# Altium footprint library Altium_Box_Header_MPC3.PcbLib: 235 footprints (part 8 of 15)
Each footprint in its own frame and in the unit in brackets; x right, y up, seen from the top. Pads: shape width x height; smd on the part's side, far side on the other; paste and mask are expansions set on the pad; w line width, h text height; cw(c..) or ccw(c..) is an arc to the next point about the centre after c.
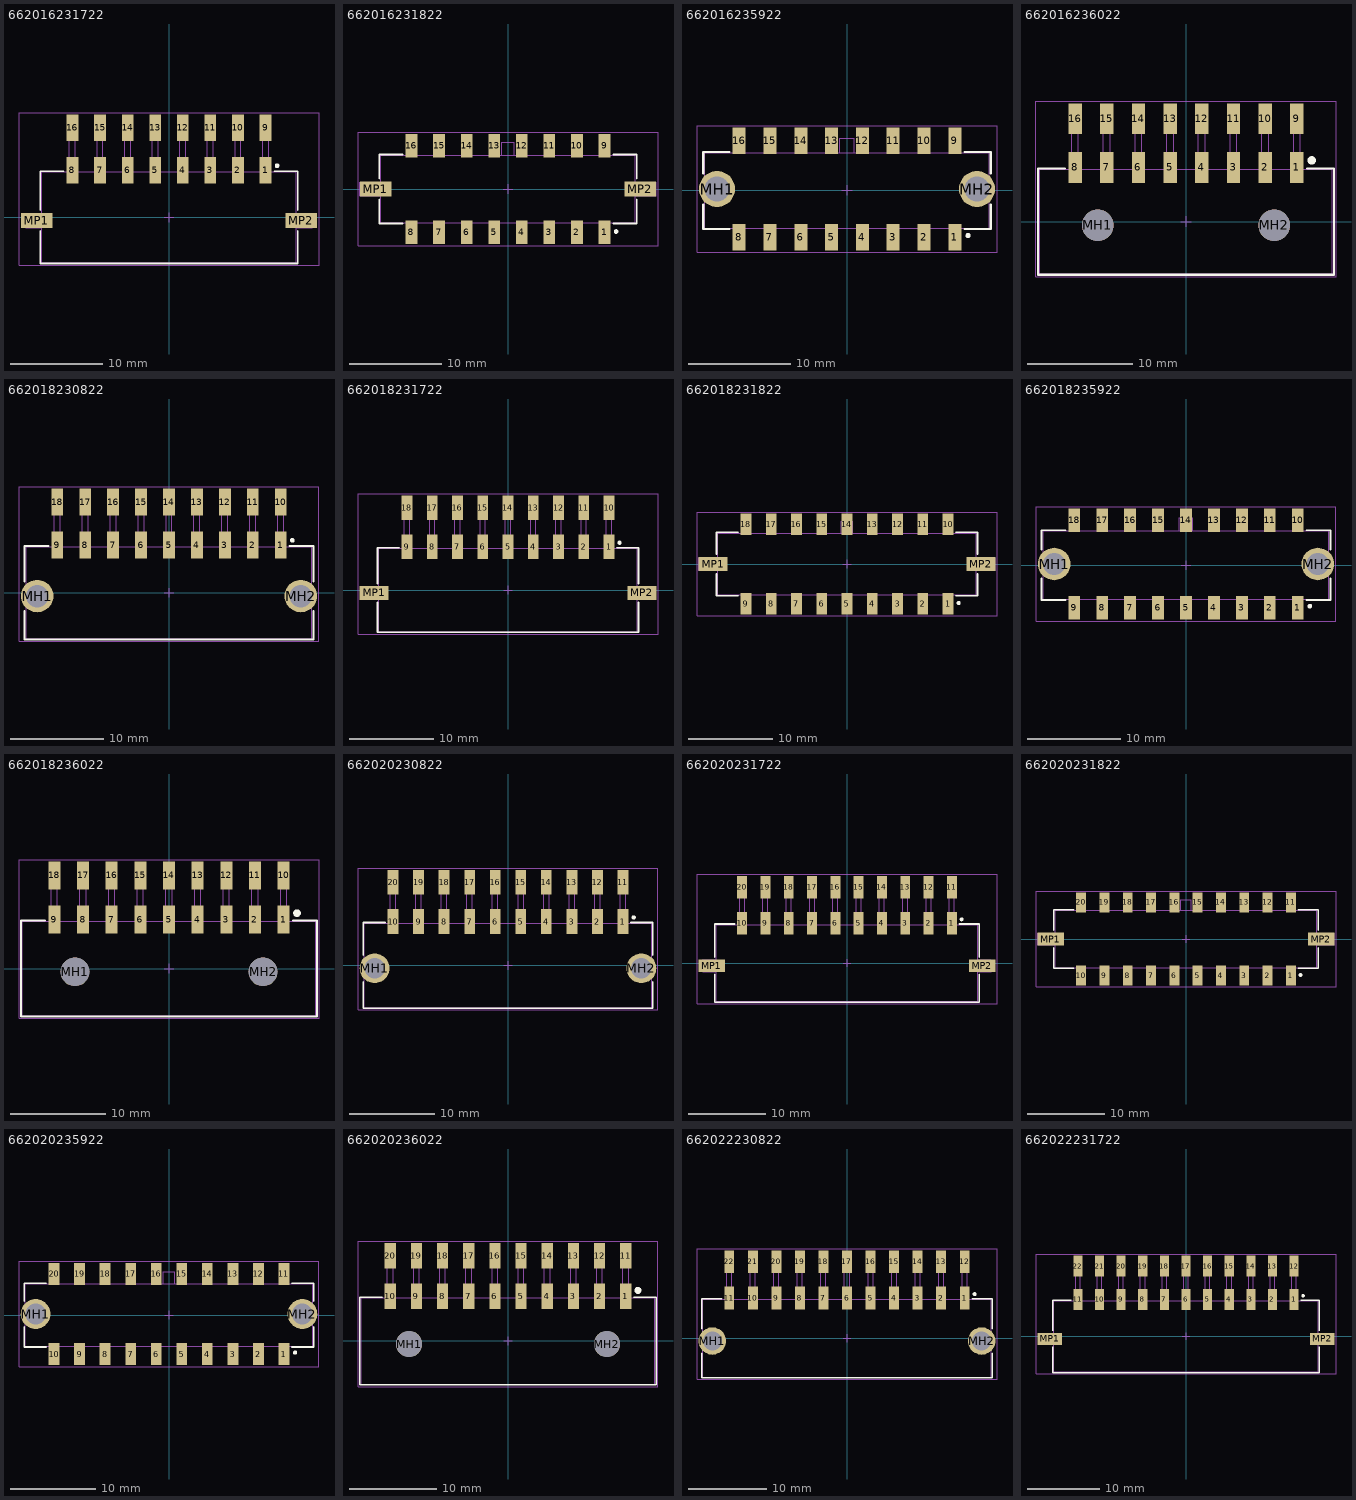
[diagram p7: the footprints below, top view; thin cyan lines are the x and y axes]

## 662016231722 [mm] "3.00mm SMT Male Dual Row Angled Header with SMT Solder Tab, 16p"
height 8.26
pads (18):
  rect 1.27x2.92 smd: 1(10.5,5.13) 2(7.5,5.13) 3(4.5,5.13) 4(1.5,5.13) 5(-1.5,5.13) 6(-4.5,5.13) 7(-7.5,5.13) 8(-10.5,5.13) 9(10.5,9.75) 10(7.5,9.75) 11(4.5,9.75) 12(1.5,9.75) 13(-1.5,9.75) 14(-4.5,9.75) 15(-7.5,9.75) 16(-10.5,9.75)
  rect 3.43x1.65 smd: MP1(-14.395,-0.35) MP2(14.395,-0.35)
Top Overlay:
  circle w0.25: c11.75,5.625 r0.125
  lines w0.2: -14,-1.475 -14,-5.025 14,-5.025 14,-1.475 ; -14,0.775 -14,5.025 -11.45,5.025 ; 11.45,5.025 14,5.025 14,0.775
Top Designator:
  text ".Designator" at -7.498,-0.5 h1.5
Top Component Outline:
  lines w0.1: -13.85,-1.1 -15.55,-1.1 -15.55,0.4 -13.85,0.4 ; -10.82,4.95 -10.82,10.95 -10.18,10.95 -10.18,4.95 ; -10.82,6.3 -10.18,6.3 ; -7.82,4.95 -7.82,10.95 -7.18,10.95 -7.18,4.95 ; -7.82,6.3 -7.18,6.3 ; -4.82,4.95 -4.82,10.95 -4.18,10.95 -4.18,4.95 ; -4.82,6.3 -4.18,6.3 ; -1.82,4.95 -1.82,10.95 -1.18,10.95 -1.18,4.95 ; -1.82,6.3 -1.18,6.3 ; 1.18,4.95 1.18,10.95 1.82,10.95 1.82,4.95 ; 1.18,6.3 1.82,6.3 ; 4.18,4.95 4.18,10.95 4.82,10.95 4.82,4.95 ; 4.18,6.3 4.82,6.3 ; 7.18,4.95 7.18,10.95 7.82,10.95 7.82,4.95 ; 7.18,6.3 7.82,6.3 ; 10.18,4.95 10.18,10.95 10.82,10.95 10.82,4.95 ; 10.18,6.3 10.82,6.3 ; 13.85,-1.1 15.55,-1.1 15.55,0.4 13.85,0.4 ; -13.85,-4.95 -13.85,4.95 13.85,4.95 13.85,-4.95 -13.85,-4.95
Top 3D Body:
  lines w0.1: -13.85,-1.1 -15.55,-1.1 -15.55,0.4 -13.85,0.4 ; -10.82,4.95 -10.82,10.95 -10.18,10.95 -10.18,4.95 ; -10.82,6.3 -10.18,6.3 ; -7.82,4.95 -7.82,10.95 -7.18,10.95 -7.18,4.95 ; -7.82,6.3 -7.18,6.3 ; -4.82,4.95 -4.82,10.95 -4.18,10.95 -4.18,4.95 ; -4.82,6.3 -4.18,6.3 ; -1.82,4.95 -1.82,10.95 -1.18,10.95 -1.18,4.95 ; -1.82,6.3 -1.18,6.3 ; 1.18,4.95 1.18,10.95 1.82,10.95 1.82,4.95 ; 1.18,6.3 1.82,6.3 ; 4.18,4.95 4.18,10.95 4.82,10.95 4.82,4.95 ; 4.18,6.3 4.82,6.3 ; 7.18,4.95 7.18,10.95 7.82,10.95 7.82,4.95 ; 7.18,6.3 7.82,6.3 ; 10.18,4.95 10.18,10.95 10.82,10.95 10.82,4.95 ; 10.18,6.3 10.82,6.3 ; 13.85,-1.1 15.55,-1.1 15.55,0.4 13.85,0.4 ; -13.85,-4.95 -13.85,4.95 13.85,4.95 13.85,-4.95 -13.85,-4.95
Top Courtyard:
  lines w0.05: -16.31,-5.225 -16.31,11.41 16.31,11.41 16.31,-5.225 -16.31,-5.225
Top Component Center:
  lines w0.05: -0.5,0 0.5,0 ; 0,-0.5 0,0.5
3D body "662016231722.stp": height 8.79, standoff 0.03, extent -15.55,-4.95 15.55,10.95

## 662016231822 [mm] "3.00mm SMT Male Dual Row Vertical Header with SMT Solder Tab, 16p"
height 9.9
pads (18):
  rect 1.27x2.54 smd: 1(10.5,-4.7) 2(7.5,-4.7) 3(4.5,-4.7) 4(1.5,-4.7) 5(-1.5,-4.7) 6(-4.5,-4.7) 7(-7.5,-4.7) 8(-10.5,-4.7) 9(10.5,4.7) 10(7.5,4.7) 11(4.5,4.7) 12(1.5,4.7) 13(-1.5,4.7) 14(-4.5,4.7) 15(-7.5,4.7) 16(-10.5,4.7)
  rect 3.43x1.65 smd: MP1(-14.395,0) MP2(14.395,0)
Top Overlay:
  circle w0.25: c11.75,-4.625 r0.125
  lines w0.2: -14,-1.155 -14,-3.755 -11.45,-3.755 ; -14,1.155 -14,3.755 -11.45,3.755 ; 11.45,-3.755 14,-3.755 14,-1.155 ; 11.45,3.755 14,3.755 14,1.155
Top Designator:
  text ".Designator" at -7.498,-0.5 h1.5
Top Component Outline:
  lines w0.1: -13.85,-0.75 -16.1,-0.75 -16.1,0.75 -13.85,0.75 ; -10.82,-3.68 -10.82,-5.698 -10.18,-5.698 -10.18,-3.68 ; -10.82,3.68 -10.82,5.698 -10.18,5.698 -10.18,3.68 ; -7.82,-3.68 -7.82,-5.698 -7.18,-5.698 -7.18,-3.68 ; -7.82,3.68 -7.82,5.698 -7.18,5.698 -7.18,3.68 ; -4.82,-3.68 -4.82,-5.698 -4.18,-5.698 -4.18,-3.68 ; -4.82,3.68 -4.82,5.698 -4.18,5.698 -4.18,3.68 ; -1.82,-3.68 -1.82,-5.698 -1.18,-5.698 -1.18,-3.68 ; -1.82,3.68 -1.82,5.698 -1.18,5.698 -1.18,3.68 ; -0.7,3.68 -0.7,5.08 0.7,5.08 0.7,3.68 ; 1.18,-3.68 1.18,-5.698 1.82,-5.698 1.82,-3.68 ; 1.18,3.68 1.18,5.698 1.82,5.698 1.82,3.68 ; 4.18,-3.68 4.18,-5.698 4.82,-5.698 4.82,-3.68 ; 4.18,3.68 4.18,5.698 4.82,5.698 4.82,3.68 ; 7.18,-3.68 7.18,-5.698 7.82,-5.698 7.82,-3.68 ; 7.18,3.68 7.18,5.698 7.82,5.698 7.82,3.68 ; 10.18,-3.68 10.18,-5.698 10.82,-5.698 10.82,-3.68 ; 10.18,3.68 10.18,5.698 10.82,5.698 10.82,3.68 ; 13.85,-0.75 16.1,-0.75 16.1,0.75 13.85,0.75 ; -13.85,-3.68 13.85,-3.68 13.85,3.68 -13.85,3.68 -13.85,-3.68
Top 3D Body:
  lines w0.1: -13.85,-0.75 -16.1,-0.75 -16.1,0.75 -13.85,0.75 ; -10.82,-3.68 -10.82,-5.698 -10.18,-5.698 -10.18,-3.68 ; -10.82,3.68 -10.82,5.698 -10.18,5.698 -10.18,3.68 ; -7.82,-3.68 -7.82,-5.698 -7.18,-5.698 -7.18,-3.68 ; -7.82,3.68 -7.82,5.698 -7.18,5.698 -7.18,3.68 ; -4.82,-3.68 -4.82,-5.698 -4.18,-5.698 -4.18,-3.68 ; -4.82,3.68 -4.82,5.698 -4.18,5.698 -4.18,3.68 ; -1.82,-3.68 -1.82,-5.698 -1.18,-5.698 -1.18,-3.68 ; -1.82,3.68 -1.82,5.698 -1.18,5.698 -1.18,3.68 ; -0.7,3.68 -0.7,5.08 0.7,5.08 0.7,3.68 ; 1.18,-3.68 1.18,-5.698 1.82,-5.698 1.82,-3.68 ; 1.18,3.68 1.18,5.698 1.82,5.698 1.82,3.68 ; 4.18,-3.68 4.18,-5.698 4.82,-5.698 4.82,-3.68 ; 4.18,3.68 4.18,5.698 4.82,5.698 4.82,3.68 ; 7.18,-3.68 7.18,-5.698 7.82,-5.698 7.82,-3.68 ; 7.18,3.68 7.18,5.698 7.82,5.698 7.82,3.68 ; 10.18,-3.68 10.18,-5.698 10.82,-5.698 10.82,-3.68 ; 10.18,3.68 10.18,5.698 10.82,5.698 10.82,3.68 ; 13.85,-0.75 16.1,-0.75 16.1,0.75 13.85,0.75 ; -13.85,-3.68 -13.85,3.68 13.85,3.68 13.85,-3.68 -13.85,-3.68
Top Courtyard:
  lines w0.05: -16.31,-6.17 16.31,-6.17 16.31,6.17 -16.31,6.17 -16.31,-6.17
Top Component Center:
  lines w0.05: -0.5,0 0.5,0 ; 0,-0.5 0,0.5
3D body "662016231822.stp": height 9.93, standoff 0.03, extent -16.1,-5.698 16.1,5.698

## 662016235922 [mm] "Dual row SMT Vertical header With TH metal clip 16p"
height 9.9
pads (18):
  rect 1.27x2.54 smd: 1(10.5,-4.57) 2(7.5,-4.57) 3(4.5,-4.57) 4(1.5,-4.57) 5(-1.5,-4.57) 6(-4.5,-4.57) 7(-7.5,-4.57) 8(-10.5,-4.57) 9(10.5,4.83) 10(7.5,4.83) 11(4.5,4.83) 12(1.5,4.83) 13(-1.5,4.83) 14(-4.5,4.83) 15(-7.5,4.83) 16(-10.5,4.83)
  round 3.5 hole 2.41: MH1(-12.66,0.13) MH2(12.66,0.13)
Top Overlay:
  circle w0.25: c11.8,-4.4 r0.125
  lines w0.2: -14,-1.405 -14,-3.755 -11.45,-3.755 ; -14,1.665 -14,3.755 -11.45,3.755 ; 11.45,-3.755 14,-3.755 14,-1.405 ; 11.45,3.755 14,3.755 14,1.665
Top Designator:
  text ".Designator" at -7.498,-0.5 h1.5
Top Component Outline:
  lines w0.1: -10.82,-3.68 -10.82,-5.5 -10.18,-5.5 -10.18,-3.68 ; -10.82,3.68 -10.82,5.9 -10.18,5.9 -10.18,3.68 ; -7.82,-3.68 -7.82,-5.5 -7.18,-5.5 -7.18,-3.68 ; -7.82,3.68 -7.82,5.9 -7.18,5.9 -7.18,3.68 ; -4.82,-3.68 -4.82,-5.5 -4.18,-5.5 -4.18,-3.68 ; -4.82,3.68 -4.82,5.9 -4.18,5.9 -4.18,3.68 ; -1.82,-3.68 -1.82,-5.5 -1.18,-5.5 -1.18,-3.68 ; -1.82,3.68 -1.82,5.9 -1.18,5.9 -1.18,3.68 ; -0.7,3.68 -0.7,5.08 0.7,5.08 0.7,3.68 ; 1.18,-3.68 1.18,-5.5 1.82,-5.5 1.82,-3.68 ; 1.18,3.68 1.18,5.9 1.82,5.9 1.82,3.68 ; 4.18,-3.68 4.18,-5.5 4.82,-5.5 4.82,-3.68 ; 4.18,3.68 4.18,5.9 4.82,5.9 4.82,3.68 ; 7.18,-3.68 7.18,-5.5 7.82,-5.5 7.82,-3.68 ; 7.18,3.68 7.18,5.9 7.82,5.9 7.82,3.68 ; 10.18,-3.68 10.18,-5.5 10.82,-5.5 10.82,-3.68 ; 10.18,3.68 10.18,5.9 10.82,5.9 10.82,3.68 ; -13.85,-3.68 -13.85,3.68 13.85,3.68 13.85,-3.68 -13.85,-3.68
Top 3D Body:
  lines w0.1: -10.82,-3.68 -10.82,-5.5 -10.18,-5.5 -10.18,-3.68 ; -10.82,3.68 -10.82,5.9 -10.18,5.9 -10.18,3.68 ; -7.82,-3.68 -7.82,-5.5 -7.18,-5.5 -7.18,-3.68 ; -7.82,3.68 -7.82,5.9 -7.18,5.9 -7.18,3.68 ; -4.82,-3.68 -4.82,-5.5 -4.18,-5.5 -4.18,-3.68 ; -4.82,3.68 -4.82,5.9 -4.18,5.9 -4.18,3.68 ; -1.82,-3.68 -1.82,-5.5 -1.18,-5.5 -1.18,-3.68 ; -1.82,3.68 -1.82,5.9 -1.18,5.9 -1.18,3.68 ; -0.7,3.68 -0.7,5.08 0.7,5.08 0.7,3.68 ; 1.18,-3.68 1.18,-5.5 1.82,-5.5 1.82,-3.68 ; 1.18,3.68 1.18,5.9 1.82,5.9 1.82,3.68 ; 4.18,-3.68 4.18,-5.5 4.82,-5.5 4.82,-3.68 ; 4.18,3.68 4.18,5.9 4.82,5.9 4.82,3.68 ; 7.18,-3.68 7.18,-5.5 7.82,-5.5 7.82,-3.68 ; 7.18,3.68 7.18,5.9 7.82,5.9 7.82,3.68 ; 10.18,-3.68 10.18,-5.5 10.82,-5.5 10.82,-3.68 ; 10.18,3.68 10.18,5.9 10.82,5.9 10.82,3.68 ; -13.85,-3.68 -13.85,3.68 13.85,3.68 13.85,-3.68 -13.85,-3.68
Top Courtyard:
  lines w0.05: -14.61,-6.04 -14.61,6.3 14.61,6.3 14.61,-6.04 -14.61,-6.04
Top Component Center:
  lines w0.05: -0.5,0 0.5,0 ; 0,-0.5 0,0.5
3D body "662016235922.stp": height 9.92, standoff -3.08, extent -13.85,-5.5 13.85,5.9

## 662016236022 [mm] "3.00mm SMT Male Dual Row Angled Header with Plastic Pegs, 16p"
height 8.26
pads (18):
  rect 1.27x2.92 smd: 1(10.5,5.13) 2(7.5,5.13) 3(4.5,5.13) 4(1.5,5.13) 5(-1.5,5.13) 6(-4.5,5.13) 7(-7.5,5.13) 8(-10.5,5.13) 9(10.5,9.75) 10(7.5,9.75) 11(4.5,9.75) 12(1.5,9.75) 13(-1.5,9.75) 14(-4.5,9.75) 15(-7.5,9.75) 16(-10.5,9.75)
  round 3 hole 3 unplated: MH1(-8.34,-0.35) MH2(8.34,-0.35)
Top Overlay:
  circle w0.4: c11.9,5.8 r0.2
  lines w0.2: -11.45,5.025 -14,5.025 -14,-5.025 14,-5.025 14,5.025 11.45,5.025
Top Designator:
  text ".Designator" at -7.498,-0.5 h1.5
Top Component Outline:
  lines w0.1: -10.82,4.95 -10.82,10.95 -10.18,10.95 -10.18,4.95 ; -10.82,6.3 -10.18,6.3 ; -7.82,4.95 -7.82,10.95 -7.18,10.95 -7.18,4.95 ; -7.82,6.3 -7.18,6.3 ; -4.82,4.95 -4.82,10.95 -4.18,10.95 -4.18,4.95 ; -4.82,6.3 -4.18,6.3 ; -1.82,4.95 -1.82,10.95 -1.18,10.95 -1.18,4.95 ; -1.82,6.3 -1.18,6.3 ; 1.18,4.95 1.18,10.95 1.82,10.95 1.82,4.95 ; 1.18,6.3 1.82,6.3 ; 4.18,4.95 4.18,10.95 4.82,10.95 4.82,4.95 ; 4.18,6.3 4.82,6.3 ; 7.18,4.95 7.18,10.95 7.82,10.95 7.82,4.95 ; 7.18,6.3 7.82,6.3 ; 10.18,4.95 10.18,10.95 10.82,10.95 10.82,4.95 ; 10.18,6.3 10.82,6.3 ; -13.85,-4.95 13.85,-4.95 13.85,4.95 -13.85,4.95 -13.85,-4.95
Top 3D Body:
  lines w0.1: -10.82,4.95 -10.82,10.95 -10.18,10.95 -10.18,4.95 ; -10.82,6.3 -10.18,6.3 ; -7.82,4.95 -7.82,10.95 -7.18,10.95 -7.18,4.95 ; -7.82,6.3 -7.18,6.3 ; -4.82,4.95 -4.82,10.95 -4.18,10.95 -4.18,4.95 ; -4.82,6.3 -4.18,6.3 ; -1.82,4.95 -1.82,10.95 -1.18,10.95 -1.18,4.95 ; -1.82,6.3 -1.18,6.3 ; 1.18,4.95 1.18,10.95 1.82,10.95 1.82,4.95 ; 1.18,6.3 1.82,6.3 ; 4.18,4.95 4.18,10.95 4.82,10.95 4.82,4.95 ; 4.18,6.3 4.82,6.3 ; 7.18,4.95 7.18,10.95 7.82,10.95 7.82,4.95 ; 7.18,6.3 7.82,6.3 ; 10.18,4.95 10.18,10.95 10.82,10.95 10.82,4.95 ; 10.18,6.3 10.82,6.3 ; -13.85,-4.95 -13.85,4.95 13.85,4.95 13.85,-4.95 -13.85,-4.95
Top Courtyard:
  lines w0.05: -14.2,-5.225 -14.2,11.41 14.2,11.41 14.2,-5.225 -14.2,-5.225
Top Component Center:
  lines w0.05: -0.5,0 0.5,0 ; 0,-0.5 0,0.5
3D body "662016236022.stp": height 8.79, standoff -3.17, extent -13.85,-4.95 13.85,10.95

## 662018230822 [mm] "Dual row SMT Right angle header With TH Metal Clip 18p"
height 8.76
pads (20):
  rect 1.27x2.92 smd: 1(12,5.13) 2(9,5.13) 3(6,5.13) 4(3,5.13) 5(0,5.13) 6(-3,5.13) 7(-6,5.13) 8(-9,5.13) 9(-12,5.13) 10(12,9.75) 11(9,9.75) 12(6,9.75) 13(3,9.75) 14(0,9.75) 15(-3,9.75) 16(-6,9.75) 17(-9,9.75) 18(-12,9.75)
  round 3.5 hole 2.41: MH1(-14.16,-0.35) MH2(14.16,-0.35)
Top Overlay:
  circle w0.25: c13.25,5.625 r0.125
  lines w0.2: -15.5,-1.925 -15.5,-5.025 15.5,-5.025 15.5,-1.925 ; -15.5,1.225 -15.5,5.025 -12.95,5.025 ; 12.95,5.025 15.5,5.025 15.5,1.225
Top Designator:
  text ".Designator" at -7.498,-0.5 h1.5
Top Component Outline:
  lines w0.1: -12.32,4.95 -12.32,10.95 -11.68,10.95 -11.68,4.95 ; -12.32,6.3 -11.68,6.3 ; -9.32,4.95 -9.32,10.95 -8.68,10.95 -8.68,4.95 ; -9.32,6.3 -8.68,6.3 ; -6.32,4.95 -6.32,10.95 -5.68,10.95 -5.68,4.95 ; -6.32,6.3 -5.68,6.3 ; -3.32,4.95 -3.32,10.95 -2.68,10.95 -2.68,4.95 ; -3.32,6.3 -2.68,6.3 ; -0.32,4.95 -0.32,10.95 0.32,10.95 0.32,4.95 ; -0.32,6.3 0.32,6.3 ; 2.68,4.95 2.68,10.95 3.32,10.95 3.32,4.95 ; 2.68,6.3 3.32,6.3 ; 5.68,4.95 5.68,10.95 6.32,10.95 6.32,4.95 ; 5.68,6.3 6.32,6.3 ; 8.68,4.95 8.68,10.95 9.32,10.95 9.32,4.95 ; 8.68,6.3 9.32,6.3 ; 11.68,4.95 11.68,10.95 12.32,10.95 12.32,4.95 ; 11.68,6.3 12.32,6.3 ; -15.35,-4.95 -15.35,4.95 15.35,4.95 15.35,-4.95 -15.35,-4.95
Top 3D Body:
  lines w0.1: -12.32,4.95 -12.32,10.95 -11.68,10.95 -11.68,4.95 ; -12.32,6.3 -11.68,6.3 ; -9.32,4.95 -9.32,10.95 -8.68,10.95 -8.68,4.95 ; -9.32,6.3 -8.68,6.3 ; -6.32,4.95 -6.32,10.95 -5.68,10.95 -5.68,4.95 ; -6.32,6.3 -5.68,6.3 ; -3.32,4.95 -3.32,10.95 -2.68,10.95 -2.68,4.95 ; -3.32,6.3 -2.68,6.3 ; -0.32,4.95 -0.32,10.95 0.32,10.95 0.32,4.95 ; -0.32,6.3 0.32,6.3 ; 2.68,4.95 2.68,10.95 3.32,10.95 3.32,4.95 ; 2.68,6.3 3.32,6.3 ; 5.68,4.95 5.68,10.95 6.32,10.95 6.32,4.95 ; 5.68,6.3 6.32,6.3 ; 8.68,4.95 8.68,10.95 9.32,10.95 9.32,4.95 ; 8.68,6.3 9.32,6.3 ; 11.68,4.95 11.68,10.95 12.32,10.95 12.32,4.95 ; 11.68,6.3 12.32,6.3 ; -15.35,-4.95 15.35,-4.95 15.35,4.95 -15.35,4.95 -15.35,-4.95
Top Courtyard:
  lines w0.05: -16.11,-5.225 -16.11,11.41 16.11,11.41 16.11,-5.225 -16.11,-5.225
Top Component Center:
  lines w0.05: -0.5,0 0.5,0 ; 0,-0.5 0,0.5
3D body "662018230822.stp": height 8.78, standoff -3.08, extent -15.35,-4.95 15.35,10.95

## 662018231722 [mm] "3.00mm SMT Male Dual Row Angled Header with SMT Solder Tab, 18p"
height 8.26
pads (20):
  rect 1.27x2.92 smd: 1(12,5.13) 2(9,5.13) 3(6,5.13) 4(3,5.13) 5(0,5.13) 6(-3,5.13) 7(-6,5.13) 8(-9,5.13) 9(-12,5.13) 10(12,9.75) 11(9,9.75) 12(6,9.75) 13(3,9.75) 14(0,9.75) 15(-3,9.75) 16(-6,9.75) 17(-9,9.75) 18(-12,9.75)
  rect 3.43x1.65 smd: MP1(-15.895,-0.35) MP2(15.895,-0.35)
Top Overlay:
  circle w0.25: c13.25,5.625 r0.125
  lines w0.2: -15.5,-1.475 -15.5,-5.025 15.5,-5.025 15.5,-1.475 ; -15.5,0.775 -15.5,5.025 -12.95,5.025 ; 12.95,5.025 15.5,5.025 15.5,0.775
Top Designator:
  text ".Designator" at -7.498,-0.5 h1.5
Top Component Outline:
  lines w0.1: -15.35,-1.1 -17.05,-1.1 -17.05,0.4 -15.35,0.4 ; -12.32,4.95 -12.32,10.95 -11.68,10.95 -11.68,4.95 ; -12.32,6.3 -11.68,6.3 ; -9.32,4.95 -9.32,10.95 -8.68,10.95 -8.68,4.95 ; -9.32,6.3 -8.68,6.3 ; -6.32,4.95 -6.32,10.95 -5.68,10.95 -5.68,4.95 ; -6.32,6.3 -5.68,6.3 ; -3.32,4.95 -3.32,10.95 -2.68,10.95 -2.68,4.95 ; -3.32,6.3 -2.68,6.3 ; -0.32,4.95 -0.32,10.95 0.32,10.95 0.32,4.95 ; -0.32,6.3 0.32,6.3 ; 2.68,4.95 2.68,10.95 3.32,10.95 3.32,4.95 ; 2.68,6.3 3.32,6.3 ; 5.68,4.95 5.68,10.95 6.32,10.95 6.32,4.95 ; 5.68,6.3 6.32,6.3 ; 8.68,4.95 8.68,10.95 9.32,10.95 9.32,4.95 ; 8.68,6.3 9.32,6.3 ; 11.68,4.95 11.68,10.95 12.32,10.95 12.32,4.95 ; 11.68,6.3 12.32,6.3 ; 15.35,-1.1 17.05,-1.1 17.05,0.4 15.35,0.4 ; -15.35,-4.95 15.35,-4.95 15.35,4.95 -15.35,4.95 -15.35,-4.95
Top 3D Body:
  lines w0.1: -15.35,-1.1 -17.05,-1.1 -17.05,0.4 -15.35,0.4 ; -12.32,4.95 -12.32,10.95 -11.68,10.95 -11.68,4.95 ; -12.32,6.3 -11.68,6.3 ; -9.32,4.95 -9.32,10.95 -8.68,10.95 -8.68,4.95 ; -9.32,6.3 -8.68,6.3 ; -6.32,4.95 -6.32,10.95 -5.68,10.95 -5.68,4.95 ; -6.32,6.3 -5.68,6.3 ; -3.32,4.95 -3.32,10.95 -2.68,10.95 -2.68,4.95 ; -3.32,6.3 -2.68,6.3 ; -0.32,4.95 -0.32,10.95 0.32,10.95 0.32,4.95 ; -0.32,6.3 0.32,6.3 ; 2.68,4.95 2.68,10.95 3.32,10.95 3.32,4.95 ; 2.68,6.3 3.32,6.3 ; 5.68,4.95 5.68,10.95 6.32,10.95 6.32,4.95 ; 5.68,6.3 6.32,6.3 ; 8.68,4.95 8.68,10.95 9.32,10.95 9.32,4.95 ; 8.68,6.3 9.32,6.3 ; 11.68,4.95 11.68,10.95 12.32,10.95 12.32,4.95 ; 11.68,6.3 12.32,6.3 ; 15.35,-1.1 17.05,-1.1 17.05,0.4 15.35,0.4 ; -15.35,-4.95 -15.35,4.95 15.35,4.95 15.35,-4.95 -15.35,-4.95
Top Courtyard:
  lines w0.05: -17.81,-5.225 -17.81,11.41 17.81,11.41 17.81,-5.225 -17.81,-5.225
Top Component Center:
  lines w0.05: -0.5,0 0.5,0 ; 0,-0.5 0,0.5
3D body "662018231722.stp": height 8.79, standoff 0.03, extent -17.05,-4.95 17.05,10.95

## 662018231822 [mm] "3.00mm SMT Male Dual Row Vertical Header with SMT Solder Tab, 18p"
height 9.9
pads (20):
  rect 1.27x2.54 smd: 1(12,-4.7) 2(9,-4.7) 3(6,-4.7) 4(3,-4.7) 5(0,-4.7) 6(-3,-4.7) 7(-6,-4.7) 8(-9,-4.7) 9(-12,-4.7) 10(12,4.7) 11(9,4.7) 12(6,4.7) 13(3,4.7) 14(0,4.7) 15(-3,4.7) 16(-6,4.7) 17(-9,4.7) 18(-12,4.7)
  rect 3.43x1.65 smd: MP1(-15.895,0) MP2(15.895,0)
Top Overlay:
  circle w0.25: c13.25,-4.625 r0.125
  lines w0.2: -15.5,-1.155 -15.5,-3.755 -12.95,-3.755 ; -15.5,1.155 -15.5,3.755 -12.95,3.755 ; 12.95,-3.755 15.5,-3.755 15.5,-1.155 ; 12.95,3.755 15.5,3.755 15.5,1.155
Top Designator:
  text ".Designator" at -7.498,-0.5 h1.5
Top Component Outline:
  lines w0.1: -15.35,-0.75 -17.6,-0.75 -17.6,0.75 -15.35,0.75 ; -12.32,-3.68 -12.32,-5.698 -11.68,-5.698 -11.68,-3.68 ; -12.32,3.68 -12.32,5.698 -11.68,5.698 -11.68,3.68 ; -9.32,-3.68 -9.32,-5.698 -8.68,-5.698 -8.68,-3.68 ; -9.32,3.68 -9.32,5.698 -8.68,5.698 -8.68,3.68 ; -6.32,-3.68 -6.32,-5.698 -5.68,-5.698 -5.68,-3.68 ; -6.32,3.68 -6.32,5.698 -5.68,5.698 -5.68,3.68 ; -3.32,-3.68 -3.32,-5.698 -2.68,-5.698 -2.68,-3.68 ; -3.32,3.68 -3.32,5.698 -2.68,5.698 -2.68,3.68 ; -0.7,3.68 -0.7,5.08 0.7,5.08 0.7,3.68 ; -0.32,-3.68 -0.32,-5.698 0.32,-5.698 0.32,-3.68 ; -0.32,3.68 -0.32,5.698 0.32,5.698 0.32,3.68 ; 2.68,-3.68 2.68,-5.698 3.32,-5.698 3.32,-3.68 ; 2.68,3.68 2.68,5.698 3.32,5.698 3.32,3.68 ; 5.68,-3.68 5.68,-5.698 6.32,-5.698 6.32,-3.68 ; 5.68,3.68 5.68,5.698 6.32,5.698 6.32,3.68 ; 8.68,-3.68 8.68,-5.698 9.32,-5.698 9.32,-3.68 ; 8.68,3.68 8.68,5.698 9.32,5.698 9.32,3.68 ; 11.68,-3.68 11.68,-5.698 12.32,-5.698 12.32,-3.68 ; 11.68,3.68 11.68,5.698 12.32,5.698 12.32,3.68 ; 15.35,-0.75 17.6,-0.75 17.6,0.75 15.35,0.75 ; -15.35,-3.68 15.35,-3.68 15.35,3.68 -15.35,3.68 -15.35,-3.68
Top 3D Body:
  lines w0.1: -15.35,-0.75 -17.6,-0.75 -17.6,0.75 -15.35,0.75 ; -12.32,-3.68 -12.32,-5.698 -11.68,-5.698 -11.68,-3.68 ; -12.32,3.68 -12.32,5.698 -11.68,5.698 -11.68,3.68 ; -9.32,-3.68 -9.32,-5.698 -8.68,-5.698 -8.68,-3.68 ; -9.32,3.68 -9.32,5.698 -8.68,5.698 -8.68,3.68 ; -6.32,-3.68 -6.32,-5.698 -5.68,-5.698 -5.68,-3.68 ; -6.32,3.68 -6.32,5.698 -5.68,5.698 -5.68,3.68 ; -3.32,-3.68 -3.32,-5.698 -2.68,-5.698 -2.68,-3.68 ; -3.32,3.68 -3.32,5.698 -2.68,5.698 -2.68,3.68 ; -0.7,3.68 -0.7,5.08 0.7,5.08 0.7,3.68 ; -0.32,-3.68 -0.32,-5.698 0.32,-5.698 0.32,-3.68 ; -0.32,3.68 -0.32,5.698 0.32,5.698 0.32,3.68 ; 2.68,-3.68 2.68,-5.698 3.32,-5.698 3.32,-3.68 ; 2.68,3.68 2.68,5.698 3.32,5.698 3.32,3.68 ; 5.68,-3.68 5.68,-5.698 6.32,-5.698 6.32,-3.68 ; 5.68,3.68 5.68,5.698 6.32,5.698 6.32,3.68 ; 8.68,-3.68 8.68,-5.698 9.32,-5.698 9.32,-3.68 ; 8.68,3.68 8.68,5.698 9.32,5.698 9.32,3.68 ; 11.68,-3.68 11.68,-5.698 12.32,-5.698 12.32,-3.68 ; 11.68,3.68 11.68,5.698 12.32,5.698 12.32,3.68 ; 15.35,-0.75 17.6,-0.75 17.6,0.75 15.35,0.75 ; -15.35,-3.68 15.35,-3.68 15.35,3.68 -15.35,3.68 -15.35,-3.68
Top Courtyard:
  lines w0.05: -17.81,-6.17 -17.81,6.17 17.81,6.17 17.81,-6.17 -17.81,-6.17
Top Component Center:
  lines w0.05: -0.5,0 0.5,0 ; 0,-0.5 0,0.5
3D body "662018231822.stp": height 9.93, standoff 0.03, extent -17.6,-5.698 17.6,5.698

## 662018235922 [mm] "Dual row SMT Vertical header With TH metal clip 18p"
height 9.9
pads (20):
  rect 1.27x2.54 smd: 1(12,-4.57) 2(9,-4.57) 3(6,-4.57) 4(3,-4.57) 5(0,-4.57) 6(-3,-4.57) 7(-6,-4.57) 8(-9,-4.57) 9(-12,-4.57) 10(12,4.83) 11(9,4.83) 12(6,4.83) 13(3,4.83) 14(0,4.83) 15(-3,4.83) 16(-6,4.83) 17(-9,4.83) 18(-12,4.83)
  round 3.5 hole 2.41: MH1(-14.16,0.13) MH2(14.16,0.13)
Top Overlay:
  circle w0.25: c13.3,-4.4 r0.125
  lines w0.2: -15.5,-1.405 -15.5,-3.755 -12.95,-3.755 ; -15.5,1.665 -15.5,3.755 -12.95,3.755 ; 12.95,-3.755 15.5,-3.755 15.5,-1.405 ; 12.95,3.755 15.5,3.755 15.5,1.665
Top Designator:
  text ".Designator" at -7.498,-0.5 h1.5
Top Component Outline:
  lines w0.1: -12.32,-3.68 -12.32,-5.5 -11.68,-5.5 -11.68,-3.68 ; -12.32,3.68 -12.32,5.9 -11.68,5.9 -11.68,3.68 ; -9.32,-3.68 -9.32,-5.5 -8.68,-5.5 -8.68,-3.68 ; -9.32,3.68 -9.32,5.9 -8.68,5.9 -8.68,3.68 ; -6.32,-3.68 -6.32,-5.5 -5.68,-5.5 -5.68,-3.68 ; -6.32,3.68 -6.32,5.9 -5.68,5.9 -5.68,3.68 ; -3.32,-3.68 -3.32,-5.5 -2.68,-5.5 -2.68,-3.68 ; -3.32,3.68 -3.32,5.9 -2.68,5.9 -2.68,3.68 ; -0.7,3.68 -0.7,5.08 0.7,5.08 0.7,3.68 ; -0.32,-3.68 -0.32,-5.5 0.32,-5.5 0.32,-3.68 ; -0.32,3.68 -0.32,5.9 0.32,5.9 0.32,3.68 ; 2.68,-3.68 2.68,-5.5 3.32,-5.5 3.32,-3.68 ; 2.68,3.68 2.68,5.9 3.32,5.9 3.32,3.68 ; 5.68,-3.68 5.68,-5.5 6.32,-5.5 6.32,-3.68 ; 5.68,3.68 5.68,5.9 6.32,5.9 6.32,3.68 ; 8.68,-3.68 8.68,-5.5 9.32,-5.5 9.32,-3.68 ; 8.68,3.68 8.68,5.9 9.32,5.9 9.32,3.68 ; 11.68,-3.68 11.68,-5.5 12.32,-5.5 12.32,-3.68 ; 11.68,3.68 11.68,5.9 12.32,5.9 12.32,3.68 ; -15.35,-3.68 15.35,-3.68 15.35,3.68 -15.35,3.68 -15.35,-3.68
Top 3D Body:
  lines w0.1: -12.32,-3.68 -12.32,-5.5 -11.68,-5.5 -11.68,-3.68 ; -12.32,3.68 -12.32,5.9 -11.68,5.9 -11.68,3.68 ; -9.32,-3.68 -9.32,-5.5 -8.68,-5.5 -8.68,-3.68 ; -9.32,3.68 -9.32,5.9 -8.68,5.9 -8.68,3.68 ; -6.32,-3.68 -6.32,-5.5 -5.68,-5.5 -5.68,-3.68 ; -6.32,3.68 -6.32,5.9 -5.68,5.9 -5.68,3.68 ; -3.32,-3.68 -3.32,-5.5 -2.68,-5.5 -2.68,-3.68 ; -3.32,3.68 -3.32,5.9 -2.68,5.9 -2.68,3.68 ; -0.7,3.68 -0.7,5.08 0.7,5.08 0.7,3.68 ; -0.32,-3.68 -0.32,-5.5 0.32,-5.5 0.32,-3.68 ; -0.32,3.68 -0.32,5.9 0.32,5.9 0.32,3.68 ; 2.68,-3.68 2.68,-5.5 3.32,-5.5 3.32,-3.68 ; 2.68,3.68 2.68,5.9 3.32,5.9 3.32,3.68 ; 5.68,-3.68 5.68,-5.5 6.32,-5.5 6.32,-3.68 ; 5.68,3.68 5.68,5.9 6.32,5.9 6.32,3.68 ; 8.68,-3.68 8.68,-5.5 9.32,-5.5 9.32,-3.68 ; 8.68,3.68 8.68,5.9 9.32,5.9 9.32,3.68 ; 11.68,-3.68 11.68,-5.5 12.32,-5.5 12.32,-3.68 ; 11.68,3.68 11.68,5.9 12.32,5.9 12.32,3.68 ; -15.35,-3.68 -15.35,3.68 15.35,3.68 15.35,-3.68 -15.35,-3.68
Top Courtyard:
  lines w0.05: -16.11,-6.04 -16.11,6.3 16.11,6.3 16.11,-6.04 -16.11,-6.04
Top Component Center:
  lines w0.05: -0.5,0 0.5,0 ; 0,-0.5 0,0.5
3D body "662018235922.stp": height 9.92, standoff -3.08, extent -15.35,-5.5 15.35,5.9

## 662018236022 [mm] "3.00mm SMT Male Dual Row Angled Header with Plastic Pegs, 18p"
height 8.26
pads (20):
  rect 1.27x2.92 smd: 1(12,5.13) 2(9,5.13) 3(6,5.13) 4(3,5.13) 5(0,5.13) 6(-3,5.13) 7(-6,5.13) 8(-9,5.13) 9(-12,5.13) 10(12,9.75) 11(9,9.75) 12(6,9.75) 13(3,9.75) 14(0,9.75) 15(-3,9.75) 16(-6,9.75) 17(-9,9.75) 18(-12,9.75)
  round 3 hole 3 unplated: MH1(-9.84,-0.35) MH2(9.84,-0.35)
Top Overlay:
  circle w0.4: c13.4,5.8 r0.2
  lines w0.2: -12.95,5.025 -15.5,5.025 -15.5,-5.025 15.5,-5.025 15.5,5.025 12.95,5.025
Top Designator:
  text ".Designator" at -7.498,-0.5 h1.5
Top Component Outline:
  lines w0.1: -12.32,4.95 -12.32,10.95 -11.68,10.95 -11.68,4.95 ; -12.32,6.3 -11.68,6.3 ; -9.32,4.95 -9.32,10.95 -8.68,10.95 -8.68,4.95 ; -9.32,6.3 -8.68,6.3 ; -6.32,4.95 -6.32,10.95 -5.68,10.95 -5.68,4.95 ; -6.32,6.3 -5.68,6.3 ; -3.32,4.95 -3.32,10.95 -2.68,10.95 -2.68,4.95 ; -3.32,6.3 -2.68,6.3 ; -0.32,4.95 -0.32,10.95 0.32,10.95 0.32,4.95 ; -0.32,6.3 0.32,6.3 ; 2.68,4.95 2.68,10.95 3.32,10.95 3.32,4.95 ; 2.68,6.3 3.32,6.3 ; 5.68,4.95 5.68,10.95 6.32,10.95 6.32,4.95 ; 5.68,6.3 6.32,6.3 ; 8.68,4.95 8.68,10.95 9.32,10.95 9.32,4.95 ; 8.68,6.3 9.32,6.3 ; 11.68,4.95 11.68,10.95 12.32,10.95 12.32,4.95 ; 11.68,6.3 12.32,6.3 ; -15.35,-4.95 15.35,-4.95 15.35,4.95 -15.35,4.95 -15.35,-4.95
Top 3D Body:
  lines w0.1: -12.32,4.95 -12.32,10.95 -11.68,10.95 -11.68,4.95 ; -12.32,6.3 -11.68,6.3 ; -9.32,4.95 -9.32,10.95 -8.68,10.95 -8.68,4.95 ; -9.32,6.3 -8.68,6.3 ; -6.32,4.95 -6.32,10.95 -5.68,10.95 -5.68,4.95 ; -6.32,6.3 -5.68,6.3 ; -3.32,4.95 -3.32,10.95 -2.68,10.95 -2.68,4.95 ; -3.32,6.3 -2.68,6.3 ; -0.32,4.95 -0.32,10.95 0.32,10.95 0.32,4.95 ; -0.32,6.3 0.32,6.3 ; 2.68,4.95 2.68,10.95 3.32,10.95 3.32,4.95 ; 2.68,6.3 3.32,6.3 ; 5.68,4.95 5.68,10.95 6.32,10.95 6.32,4.95 ; 5.68,6.3 6.32,6.3 ; 8.68,4.95 8.68,10.95 9.32,10.95 9.32,4.95 ; 8.68,6.3 9.32,6.3 ; 11.68,4.95 11.68,10.95 12.32,10.95 12.32,4.95 ; 11.68,6.3 12.32,6.3 ; -15.35,-4.95 15.35,-4.95 15.35,4.95 -15.35,4.95 -15.35,-4.95
Top Courtyard:
  lines w0.05: -15.7,-5.225 15.7,-5.225 15.7,11.41 -15.7,11.41 -15.7,-5.225
Top Component Center:
  lines w0.05: -0.5,0 0.5,0 ; 0,-0.5 0,0.5
3D body "662018236022.stp": height 8.79, standoff -3.17, extent -15.35,-4.95 15.35,10.95

## 662020230822 [mm] "Dual row SMT Right angle header With TH Metal Clip 20p"
height 8.76
pads (22):
  rect 1.27x2.92 smd: 1(13.5,5.13) 2(10.5,5.13) 3(7.5,5.13) 4(4.5,5.13) 5(1.5,5.13) 6(-1.5,5.13) 7(-4.5,5.13) 8(-7.5,5.13) 9(-10.5,5.13) 10(-13.5,5.13) 11(13.5,9.75) 12(10.5,9.75) 13(7.5,9.75) 14(4.5,9.75) 15(1.5,9.75) 16(-1.5,9.75) 17(-4.5,9.75) 18(-7.5,9.75) 19(-10.5,9.75) 20(-13.5,9.75)
  round 3.5 hole 2.41: MH1(-15.66,-0.35) MH2(15.66,-0.35)
Top Overlay:
  circle w0.25: c14.75,5.625 r0.125
  lines w0.2: -17,-1.925 -17,-5.025 17,-5.025 17,-1.925 ; -17,1.225 -17,5.025 -14.45,5.025 ; 14.45,5.025 17,5.025 17,1.225
Top Designator:
  text ".Designator" at -7.498,-0.5 h1.5
Top Component Outline:
  lines w0.1: -13.82,4.95 -13.82,10.95 -13.18,10.95 -13.18,4.95 ; -13.82,6.3 -13.18,6.3 ; -10.82,4.95 -10.82,10.95 -10.18,10.95 -10.18,4.95 ; -10.82,6.3 -10.18,6.3 ; -7.82,4.95 -7.82,10.95 -7.18,10.95 -7.18,4.95 ; -7.82,6.3 -7.18,6.3 ; -4.82,4.95 -4.82,10.95 -4.18,10.95 -4.18,4.95 ; -4.82,6.3 -4.18,6.3 ; -1.82,4.95 -1.82,10.95 -1.18,10.95 -1.18,4.95 ; -1.82,6.3 -1.18,6.3 ; 1.18,4.95 1.18,10.95 1.82,10.95 1.82,4.95 ; 1.18,6.3 1.82,6.3 ; 4.18,4.95 4.18,10.95 4.82,10.95 4.82,4.95 ; 4.18,6.3 4.82,6.3 ; 7.18,4.95 7.18,10.95 7.82,10.95 7.82,4.95 ; 7.18,6.3 7.82,6.3 ; 10.18,4.95 10.18,10.95 10.82,10.95 10.82,4.95 ; 10.18,6.3 10.82,6.3 ; 13.18,4.95 13.18,10.95 13.82,10.95 13.82,4.95 ; 13.18,6.3 13.82,6.3 ; -16.85,-4.95 -16.85,4.95 16.85,4.95 16.85,-4.95 -16.85,-4.95
Top 3D Body:
  lines w0.1: -13.82,4.95 -13.82,10.95 -13.18,10.95 -13.18,4.95 ; -13.82,6.3 -13.18,6.3 ; -10.82,4.95 -10.82,10.95 -10.18,10.95 -10.18,4.95 ; -10.82,6.3 -10.18,6.3 ; -7.82,4.95 -7.82,10.95 -7.18,10.95 -7.18,4.95 ; -7.82,6.3 -7.18,6.3 ; -4.82,4.95 -4.82,10.95 -4.18,10.95 -4.18,4.95 ; -4.82,6.3 -4.18,6.3 ; -1.82,4.95 -1.82,10.95 -1.18,10.95 -1.18,4.95 ; -1.82,6.3 -1.18,6.3 ; 1.18,4.95 1.18,10.95 1.82,10.95 1.82,4.95 ; 1.18,6.3 1.82,6.3 ; 4.18,4.95 4.18,10.95 4.82,10.95 4.82,4.95 ; 4.18,6.3 4.82,6.3 ; 7.18,4.95 7.18,10.95 7.82,10.95 7.82,4.95 ; 7.18,6.3 7.82,6.3 ; 10.18,4.95 10.18,10.95 10.82,10.95 10.82,4.95 ; 10.18,6.3 10.82,6.3 ; 13.18,4.95 13.18,10.95 13.82,10.95 13.82,4.95 ; 13.18,6.3 13.82,6.3 ; -16.85,-4.95 -16.85,4.95 16.85,4.95 16.85,-4.95 -16.85,-4.95
Top Courtyard:
  lines w0.05: -17.61,-5.225 17.61,-5.225 17.61,11.41 -17.61,11.41 -17.61,-5.225
Top Component Center:
  lines w0.05: -0.5,0 0.5,0 ; 0,-0.5 0,0.5
3D body "662020230822.stp": height 8.78, standoff -3.08, extent -16.85,-4.95 16.85,10.95

## 662020231722 [mm] "3.00mm SMT Male Dual Row Angled Header with SMT Solder Tab, 20p"
height 8.26
pads (22):
  rect 1.27x2.92 smd: 1(13.5,5.13) 2(10.5,5.13) 3(7.5,5.13) 4(4.5,5.13) 5(1.5,5.13) 6(-1.5,5.13) 7(-4.5,5.13) 8(-7.5,5.13) 9(-10.5,5.13) 10(-13.5,5.13) 11(13.5,9.75) 12(10.5,9.75) 13(7.5,9.75) 14(4.5,9.75) 15(1.5,9.75) 16(-1.5,9.75) 17(-4.5,9.75) 18(-7.5,9.75) 19(-10.5,9.75) 20(-13.5,9.75)
  rect 3.43x1.65 smd: MP1(-17.395,-0.35) MP2(17.395,-0.35)
Top Overlay:
  circle w0.25: c14.75,5.625 r0.125
  lines w0.2: -17,-1.475 -17,-5.025 17,-5.025 17,-1.475 ; -17,0.775 -17,5.025 -14.45,5.025 ; 14.45,5.025 17,5.025 17,0.775
Top Designator:
  text ".Designator" at -7.498,-0.5 h1.5
Top Component Outline:
  lines w0.1: -16.85,-1.1 -18.55,-1.1 -18.55,0.4 -16.85,0.4 ; -13.82,4.95 -13.82,10.95 -13.18,10.95 -13.18,4.95 ; -13.82,6.3 -13.18,6.3 ; -10.82,4.95 -10.82,10.95 -10.18,10.95 -10.18,4.95 ; -10.82,6.3 -10.18,6.3 ; -7.82,4.95 -7.82,10.95 -7.18,10.95 -7.18,4.95 ; -7.82,6.3 -7.18,6.3 ; -4.82,4.95 -4.82,10.95 -4.18,10.95 -4.18,4.95 ; -4.82,6.3 -4.18,6.3 ; -1.82,4.95 -1.82,10.95 -1.18,10.95 -1.18,4.95 ; -1.82,6.3 -1.18,6.3 ; 1.18,4.95 1.18,10.95 1.82,10.95 1.82,4.95 ; 1.18,6.3 1.82,6.3 ; 4.18,4.95 4.18,10.95 4.82,10.95 4.82,4.95 ; 4.18,6.3 4.82,6.3 ; 7.18,4.95 7.18,10.95 7.82,10.95 7.82,4.95 ; 7.18,6.3 7.82,6.3 ; 10.18,4.95 10.18,10.95 10.82,10.95 10.82,4.95 ; 10.18,6.3 10.82,6.3 ; 13.18,4.95 13.18,10.95 13.82,10.95 13.82,4.95 ; 13.18,6.3 13.82,6.3 ; 16.85,-1.1 18.55,-1.1 18.55,0.4 16.85,0.4 ; -16.85,-4.95 16.85,-4.95 16.85,4.95 -16.85,4.95 -16.85,-4.95
Top 3D Body:
  lines w0.1: -16.85,-1.1 -18.55,-1.1 -18.55,0.4 -16.85,0.4 ; -13.82,4.95 -13.82,10.95 -13.18,10.95 -13.18,4.95 ; -13.82,6.3 -13.18,6.3 ; -10.82,4.95 -10.82,10.95 -10.18,10.95 -10.18,4.95 ; -10.82,6.3 -10.18,6.3 ; -7.82,4.95 -7.82,10.95 -7.18,10.95 -7.18,4.95 ; -7.82,6.3 -7.18,6.3 ; -4.82,4.95 -4.82,10.95 -4.18,10.95 -4.18,4.95 ; -4.82,6.3 -4.18,6.3 ; -1.82,4.95 -1.82,10.95 -1.18,10.95 -1.18,4.95 ; -1.82,6.3 -1.18,6.3 ; 1.18,4.95 1.18,10.95 1.82,10.95 1.82,4.95 ; 1.18,6.3 1.82,6.3 ; 4.18,4.95 4.18,10.95 4.82,10.95 4.82,4.95 ; 4.18,6.3 4.82,6.3 ; 7.18,4.95 7.18,10.95 7.82,10.95 7.82,4.95 ; 7.18,6.3 7.82,6.3 ; 10.18,4.95 10.18,10.95 10.82,10.95 10.82,4.95 ; 10.18,6.3 10.82,6.3 ; 13.18,4.95 13.18,10.95 13.82,10.95 13.82,4.95 ; 13.18,6.3 13.82,6.3 ; 16.85,-1.1 18.55,-1.1 18.55,0.4 16.85,0.4 ; -16.85,-4.95 -16.85,4.95 16.85,4.95 16.85,-4.95 -16.85,-4.95
Top Courtyard:
  lines w0.05: -19.31,-5.225 -19.31,11.41 19.31,11.41 19.31,-5.225 -19.31,-5.225
Top Component Center:
  lines w0.05: -0.5,0 0.5,0 ; 0,-0.5 0,0.5
3D body "662020231722.stp": height 8.79, standoff 0.03, extent -18.55,-4.95 18.55,10.95

## 662020231822 [mm] "3.00mm SMT Male Dual Row Vertical Header with SMT Solder Tab, 20p"
height 9.9
pads (22):
  rect 1.27x2.54 smd: 1(13.5,-4.7) 2(10.5,-4.7) 3(7.5,-4.7) 4(4.5,-4.7) 5(1.5,-4.7) 6(-1.5,-4.7) 7(-4.5,-4.7) 8(-7.5,-4.7) 9(-10.5,-4.7) 10(-13.5,-4.7) 11(13.5,4.7) 12(10.5,4.7) 13(7.5,4.7) 14(4.5,4.7) 15(1.5,4.7) 16(-1.5,4.7) 17(-4.5,4.7) 18(-7.5,4.7) 19(-10.5,4.7) 20(-13.5,4.7)
  rect 3.43x1.65 smd: MP1(-17.395,0) MP2(17.395,0)
Top Overlay:
  circle w0.25: c14.75,-4.625 r0.125
  lines w0.2: -17,-1.155 -17,-3.755 -14.45,-3.755 ; -17,1.155 -17,3.755 -14.45,3.755 ; 14.45,-3.755 17,-3.755 17,-1.155 ; 14.45,3.755 17,3.755 17,1.155
Top Designator:
  text ".Designator" at -7.498,-0.5 h1.5
Top Component Outline:
  lines w0.1: -16.85,-0.75 -19.1,-0.75 -19.1,0.75 -16.85,0.75 ; -13.82,-3.68 -13.82,-5.698 -13.18,-5.698 -13.18,-3.68 ; -13.82,3.68 -13.82,5.698 -13.18,5.698 -13.18,3.68 ; -10.82,-3.68 -10.82,-5.698 -10.18,-5.698 -10.18,-3.68 ; -10.82,3.68 -10.82,5.698 -10.18,5.698 -10.18,3.68 ; -7.82,-3.68 -7.82,-5.698 -7.18,-5.698 -7.18,-3.68 ; -7.82,3.68 -7.82,5.698 -7.18,5.698 -7.18,3.68 ; -4.82,-3.68 -4.82,-5.698 -4.18,-5.698 -4.18,-3.68 ; -4.82,3.68 -4.82,5.698 -4.18,5.698 -4.18,3.68 ; -1.82,-3.68 -1.82,-5.698 -1.18,-5.698 -1.18,-3.68 ; -1.82,3.68 -1.82,5.698 -1.18,5.698 -1.18,3.68 ; -0.7,3.68 -0.7,5.08 0.7,5.08 0.7,3.68 ; 1.18,-3.68 1.18,-5.698 1.82,-5.698 1.82,-3.68 ; 1.18,3.68 1.18,5.698 1.82,5.698 1.82,3.68 ; 4.18,-3.68 4.18,-5.698 4.82,-5.698 4.82,-3.68 ; 4.18,3.68 4.18,5.698 4.82,5.698 4.82,3.68 ; 7.18,-3.68 7.18,-5.698 7.82,-5.698 7.82,-3.68 ; 7.18,3.68 7.18,5.698 7.82,5.698 7.82,3.68 ; 10.18,-3.68 10.18,-5.698 10.82,-5.698 10.82,-3.68 ; 10.18,3.68 10.18,5.698 10.82,5.698 10.82,3.68 ; 13.18,-3.68 13.18,-5.698 13.82,-5.698 13.82,-3.68 ; 13.18,3.68 13.18,5.698 13.82,5.698 13.82,3.68 ; 16.85,-0.75 19.1,-0.75 19.1,0.75 16.85,0.75 ; -16.85,-3.68 16.85,-3.68 16.85,3.68 -16.85,3.68 -16.85,-3.68
Top 3D Body:
  lines w0.1: -16.85,-0.75 -19.1,-0.75 -19.1,0.75 -16.85,0.75 ; -13.82,-3.68 -13.82,-5.698 -13.18,-5.698 -13.18,-3.68 ; -13.82,3.68 -13.82,5.698 -13.18,5.698 -13.18,3.68 ; -10.82,-3.68 -10.82,-5.698 -10.18,-5.698 -10.18,-3.68 ; -10.82,3.68 -10.82,5.698 -10.18,5.698 -10.18,3.68 ; -7.82,-3.68 -7.82,-5.698 -7.18,-5.698 -7.18,-3.68 ; -7.82,3.68 -7.82,5.698 -7.18,5.698 -7.18,3.68 ; -4.82,-3.68 -4.82,-5.698 -4.18,-5.698 -4.18,-3.68 ; -4.82,3.68 -4.82,5.698 -4.18,5.698 -4.18,3.68 ; -1.82,-3.68 -1.82,-5.698 -1.18,-5.698 -1.18,-3.68 ; -1.82,3.68 -1.82,5.698 -1.18,5.698 -1.18,3.68 ; -0.7,3.68 -0.7,5.08 0.7,5.08 0.7,3.68 ; 1.18,-3.68 1.18,-5.698 1.82,-5.698 1.82,-3.68 ; 1.18,3.68 1.18,5.698 1.82,5.698 1.82,3.68 ; 4.18,-3.68 4.18,-5.698 4.82,-5.698 4.82,-3.68 ; 4.18,3.68 4.18,5.698 4.82,5.698 4.82,3.68 ; 7.18,-3.68 7.18,-5.698 7.82,-5.698 7.82,-3.68 ; 7.18,3.68 7.18,5.698 7.82,5.698 7.82,3.68 ; 10.18,-3.68 10.18,-5.698 10.82,-5.698 10.82,-3.68 ; 10.18,3.68 10.18,5.698 10.82,5.698 10.82,3.68 ; 13.18,-3.68 13.18,-5.698 13.82,-5.698 13.82,-3.68 ; 13.18,3.68 13.18,5.698 13.82,5.698 13.82,3.68 ; 16.85,-0.75 19.1,-0.75 19.1,0.75 16.85,0.75 ; -16.85,-3.68 -16.85,3.68 16.85,3.68 16.85,-3.68 -16.85,-3.68
Top Courtyard:
  lines w0.05: -19.31,-6.17 19.31,-6.17 19.31,6.17 -19.31,6.17 -19.31,-6.17
Top Component Center:
  lines w0.05: -0.5,0 0.5,0 ; 0,-0.5 0,0.5
3D body "662020231822.stp": height 9.93, standoff 0.03, extent -19.1,-5.698 19.1,5.698

## 662020235922 [mm] "Dual row SMT Vertical header With TH metal clip 20p"
height 9.9
pads (22):
  rect 1.27x2.54 smd: 1(13.5,-4.57) 2(10.5,-4.57) 3(7.5,-4.57) 4(4.5,-4.57) 5(1.5,-4.57) 6(-1.5,-4.57) 7(-4.5,-4.57) 8(-7.5,-4.57) 9(-10.5,-4.57) 10(-13.5,-4.57) 11(13.5,4.83) 12(10.5,4.83) 13(7.5,4.83) 14(4.5,4.83) 15(1.5,4.83) 16(-1.5,4.83) 17(-4.5,4.83) 18(-7.5,4.83) 19(-10.5,4.83) 20(-13.5,4.83)
  round 3.5 hole 2.41: MH1(-15.66,0.13) MH2(15.66,0.13)
Top Overlay:
  circle w0.25: c14.8,-4.4 r0.125
  lines w0.2: -17,-1.405 -17,-3.755 -14.45,-3.755 ; -17,1.665 -17,3.755 -14.45,3.755 ; 14.45,-3.755 17,-3.755 17,-1.405 ; 14.45,3.755 17,3.755 17,1.665
Top Designator:
  text ".Designator" at -7.498,-0.5 h1.5
Top Component Outline:
  lines w0.1: -13.82,-3.68 -13.82,-5.5 -13.18,-5.5 -13.18,-3.68 ; -13.82,3.68 -13.82,5.9 -13.18,5.9 -13.18,3.68 ; -10.82,-3.68 -10.82,-5.5 -10.18,-5.5 -10.18,-3.68 ; -10.82,3.68 -10.82,5.9 -10.18,5.9 -10.18,3.68 ; -7.82,-3.68 -7.82,-5.5 -7.18,-5.5 -7.18,-3.68 ; -7.82,3.68 -7.82,5.9 -7.18,5.9 -7.18,3.68 ; -4.82,-3.68 -4.82,-5.5 -4.18,-5.5 -4.18,-3.68 ; -4.82,3.68 -4.82,5.9 -4.18,5.9 -4.18,3.68 ; -1.82,-3.68 -1.82,-5.5 -1.18,-5.5 -1.18,-3.68 ; -1.82,3.68 -1.82,5.9 -1.18,5.9 -1.18,3.68 ; -0.7,3.68 -0.7,5.08 0.7,5.08 0.7,3.68 ; 1.18,-3.68 1.18,-5.5 1.82,-5.5 1.82,-3.68 ; 1.18,3.68 1.18,5.9 1.82,5.9 1.82,3.68 ; 4.18,-3.68 4.18,-5.5 4.82,-5.5 4.82,-3.68 ; 4.18,3.68 4.18,5.9 4.82,5.9 4.82,3.68 ; 7.18,-3.68 7.18,-5.5 7.82,-5.5 7.82,-3.68 ; 7.18,3.68 7.18,5.9 7.82,5.9 7.82,3.68 ; 10.18,-3.68 10.18,-5.5 10.82,-5.5 10.82,-3.68 ; 10.18,3.68 10.18,5.9 10.82,5.9 10.82,3.68 ; 13.18,-3.68 13.18,-5.5 13.82,-5.5 13.82,-3.68 ; 13.18,3.68 13.18,5.9 13.82,5.9 13.82,3.68 ; -16.85,-3.68 -16.85,3.68 16.85,3.68 16.85,-3.68 -16.85,-3.68
Top 3D Body:
  lines w0.1: -13.82,-3.68 -13.82,-5.5 -13.18,-5.5 -13.18,-3.68 ; -13.82,3.68 -13.82,5.9 -13.18,5.9 -13.18,3.68 ; -10.82,-3.68 -10.82,-5.5 -10.18,-5.5 -10.18,-3.68 ; -10.82,3.68 -10.82,5.9 -10.18,5.9 -10.18,3.68 ; -7.82,-3.68 -7.82,-5.5 -7.18,-5.5 -7.18,-3.68 ; -7.82,3.68 -7.82,5.9 -7.18,5.9 -7.18,3.68 ; -4.82,-3.68 -4.82,-5.5 -4.18,-5.5 -4.18,-3.68 ; -4.82,3.68 -4.82,5.9 -4.18,5.9 -4.18,3.68 ; -1.82,-3.68 -1.82,-5.5 -1.18,-5.5 -1.18,-3.68 ; -1.82,3.68 -1.82,5.9 -1.18,5.9 -1.18,3.68 ; -0.7,3.68 -0.7,5.08 0.7,5.08 0.7,3.68 ; 1.18,-3.68 1.18,-5.5 1.82,-5.5 1.82,-3.68 ; 1.18,3.68 1.18,5.9 1.82,5.9 1.82,3.68 ; 4.18,-3.68 4.18,-5.5 4.82,-5.5 4.82,-3.68 ; 4.18,3.68 4.18,5.9 4.82,5.9 4.82,3.68 ; 7.18,-3.68 7.18,-5.5 7.82,-5.5 7.82,-3.68 ; 7.18,3.68 7.18,5.9 7.82,5.9 7.82,3.68 ; 10.18,-3.68 10.18,-5.5 10.82,-5.5 10.82,-3.68 ; 10.18,3.68 10.18,5.9 10.82,5.9 10.82,3.68 ; 13.18,-3.68 13.18,-5.5 13.82,-5.5 13.82,-3.68 ; 13.18,3.68 13.18,5.9 13.82,5.9 13.82,3.68 ; -16.85,-3.68 -16.85,3.68 16.85,3.68 16.85,-3.68 -16.85,-3.68
Top Courtyard:
  lines w0.05: -17.61,-6.04 -17.61,6.3 17.61,6.3 17.61,-6.04 -17.61,-6.04
Top Component Center:
  lines w0.05: -0.5,0 0.5,0 ; 0,-0.5 0,0.5
3D body "662020235922.stp": height 9.92, standoff -3.08, extent -16.85,-5.5 16.85,5.9

## 662020236022 [mm] "3.00mm SMT Male Dual Row Angled Header with Plastic Pegs, 20p"
height 8.26
pads (22):
  rect 1.27x2.92 smd: 1(13.5,5.13) 2(10.5,5.13) 3(7.5,5.13) 4(4.5,5.13) 5(1.5,5.13) 6(-1.5,5.13) 7(-4.5,5.13) 8(-7.5,5.13) 9(-10.5,5.13) 10(-13.5,5.13) 11(13.5,9.75) 12(10.5,9.75) 13(7.5,9.75) 14(4.5,9.75) 15(1.5,9.75) 16(-1.5,9.75) 17(-4.5,9.75) 18(-7.5,9.75) 19(-10.5,9.75) 20(-13.5,9.75)
  round 3 hole 3 unplated: MH1(-11.34,-0.35) MH2(11.34,-0.35)
Top Overlay:
  circle w0.4: c14.9,5.8 r0.2
  lines w0.2: -14.45,5.025 -17,5.025 -17,-5.025 17,-5.025 17,5.025 14.45,5.025
Top Designator:
  text ".Designator" at -7.498,-0.5 h1.5
Top Component Outline:
  lines w0.1: -13.82,4.95 -13.82,10.95 -13.18,10.95 -13.18,4.95 ; -13.82,6.3 -13.18,6.3 ; -10.82,4.95 -10.82,10.95 -10.18,10.95 -10.18,4.95 ; -10.82,6.3 -10.18,6.3 ; -7.82,4.95 -7.82,10.95 -7.18,10.95 -7.18,4.95 ; -7.82,6.3 -7.18,6.3 ; -4.82,4.95 -4.82,10.95 -4.18,10.95 -4.18,4.95 ; -4.82,6.3 -4.18,6.3 ; -1.82,4.95 -1.82,10.95 -1.18,10.95 -1.18,4.95 ; -1.82,6.3 -1.18,6.3 ; 1.18,4.95 1.18,10.95 1.82,10.95 1.82,4.95 ; 1.18,6.3 1.82,6.3 ; 4.18,4.95 4.18,10.95 4.82,10.95 4.82,4.95 ; 4.18,6.3 4.82,6.3 ; 7.18,4.95 7.18,10.95 7.82,10.95 7.82,4.95 ; 7.18,6.3 7.82,6.3 ; 10.18,4.95 10.18,10.95 10.82,10.95 10.82,4.95 ; 10.18,6.3 10.82,6.3 ; 13.18,4.95 13.18,10.95 13.82,10.95 13.82,4.95 ; 13.18,6.3 13.82,6.3 ; -16.85,-4.95 -16.85,4.95 16.85,4.95 16.85,-4.95 -16.85,-4.95
Top 3D Body:
  lines w0.1: -13.82,4.95 -13.82,10.95 -13.18,10.95 -13.18,4.95 ; -13.82,6.3 -13.18,6.3 ; -10.82,4.95 -10.82,10.95 -10.18,10.95 -10.18,4.95 ; -10.82,6.3 -10.18,6.3 ; -7.82,4.95 -7.82,10.95 -7.18,10.95 -7.18,4.95 ; -7.82,6.3 -7.18,6.3 ; -4.82,4.95 -4.82,10.95 -4.18,10.95 -4.18,4.95 ; -4.82,6.3 -4.18,6.3 ; -1.82,4.95 -1.82,10.95 -1.18,10.95 -1.18,4.95 ; -1.82,6.3 -1.18,6.3 ; 1.18,4.95 1.18,10.95 1.82,10.95 1.82,4.95 ; 1.18,6.3 1.82,6.3 ; 4.18,4.95 4.18,10.95 4.82,10.95 4.82,4.95 ; 4.18,6.3 4.82,6.3 ; 7.18,4.95 7.18,10.95 7.82,10.95 7.82,4.95 ; 7.18,6.3 7.82,6.3 ; 10.18,4.95 10.18,10.95 10.82,10.95 10.82,4.95 ; 10.18,6.3 10.82,6.3 ; 13.18,4.95 13.18,10.95 13.82,10.95 13.82,4.95 ; 13.18,6.3 13.82,6.3 ; -16.85,-4.95 16.85,-4.95 16.85,4.95 -16.85,4.95 -16.85,-4.95
Top Courtyard:
  lines w0.05: -17.2,-5.225 17.2,-5.225 17.2,11.41 -17.2,11.41 -17.2,-5.225
Top Component Center:
  lines w0.05: -0.5,0 0.5,0 ; 0,-0.5 0,0.5
3D body "662020236022.stp": height 8.79, standoff -3.17, extent -16.85,-4.95 16.85,10.95

## 662022230822 [mm] "Dual row SMT Right angle header With TH Metal Clip 22p"
height 8.76
pads (24):
  rect 1.27x2.92 smd: 1(15,5.13) 2(12,5.13) 3(9,5.13) 4(6,5.13) 5(3,5.13) 6(0,5.13) 7(-3,5.13) 8(-6,5.13) 9(-9,5.13) 10(-12,5.13) 11(-15,5.13) 12(15,9.75) 13(12,9.75) 14(9,9.75) 15(6,9.75) 16(3,9.75) 17(0,9.75) 18(-3,9.75) 19(-6,9.75) 20(-9,9.75) 21(-12,9.75) 22(-15,9.75)
  round 3.5 hole 2.41: MH1(-17.16,-0.35) MH2(17.16,-0.35)
Top Overlay:
  circle w0.25: c16.25,5.625 r0.125
  lines w0.2: -18.5,-1.925 -18.5,-5.025 18.5,-5.025 18.5,-1.925 ; -18.5,1.225 -18.5,5.025 -15.95,5.025 ; 15.95,5.025 18.5,5.025 18.5,1.225
Top Designator:
  text ".Designator" at -7.498,-0.5 h1.5
Top Component Outline:
  lines w0.1: -15.32,4.95 -15.32,10.95 -14.68,10.95 -14.68,4.95 ; -15.32,6.3 -14.68,6.3 ; -12.32,4.95 -12.32,10.95 -11.68,10.95 -11.68,4.95 ; -12.32,6.3 -11.68,6.3 ; -9.32,4.95 -9.32,10.95 -8.68,10.95 -8.68,4.95 ; -9.32,6.3 -8.68,6.3 ; -6.32,4.95 -6.32,10.95 -5.68,10.95 -5.68,4.95 ; -6.32,6.3 -5.68,6.3 ; -3.32,4.95 -3.32,10.95 -2.68,10.95 -2.68,4.95 ; -3.32,6.3 -2.68,6.3 ; -0.32,4.95 -0.32,10.95 0.32,10.95 0.32,4.95 ; -0.32,6.3 0.32,6.3 ; 2.68,4.95 2.68,10.95 3.32,10.95 3.32,4.95 ; 2.68,6.3 3.32,6.3 ; 5.68,4.95 5.68,10.95 6.32,10.95 6.32,4.95 ; 5.68,6.3 6.32,6.3 ; 8.68,4.95 8.68,10.95 9.32,10.95 9.32,4.95 ; 8.68,6.3 9.32,6.3 ; 11.68,4.95 11.68,10.95 12.32,10.95 12.32,4.95 ; 11.68,6.3 12.32,6.3 ; 14.68,4.95 14.68,10.95 15.32,10.95 15.32,4.95 ; 14.68,6.3 15.32,6.3 ; -18.35,-4.95 -18.35,4.95 18.35,4.95 18.35,-4.95 -18.35,-4.95
Top 3D Body:
  lines w0.1: -15.32,4.95 -15.32,10.95 -14.68,10.95 -14.68,4.95 ; -15.32,6.3 -14.68,6.3 ; -12.32,4.95 -12.32,10.95 -11.68,10.95 -11.68,4.95 ; -12.32,6.3 -11.68,6.3 ; -9.32,4.95 -9.32,10.95 -8.68,10.95 -8.68,4.95 ; -9.32,6.3 -8.68,6.3 ; -6.32,4.95 -6.32,10.95 -5.68,10.95 -5.68,4.95 ; -6.32,6.3 -5.68,6.3 ; -3.32,4.95 -3.32,10.95 -2.68,10.95 -2.68,4.95 ; -3.32,6.3 -2.68,6.3 ; -0.32,4.95 -0.32,10.95 0.32,10.95 0.32,4.95 ; -0.32,6.3 0.32,6.3 ; 2.68,4.95 2.68,10.95 3.32,10.95 3.32,4.95 ; 2.68,6.3 3.32,6.3 ; 5.68,4.95 5.68,10.95 6.32,10.95 6.32,4.95 ; 5.68,6.3 6.32,6.3 ; 8.68,4.95 8.68,10.95 9.32,10.95 9.32,4.95 ; 8.68,6.3 9.32,6.3 ; 11.68,4.95 11.68,10.95 12.32,10.95 12.32,4.95 ; 11.68,6.3 12.32,6.3 ; 14.68,4.95 14.68,10.95 15.32,10.95 15.32,4.95 ; 14.68,6.3 15.32,6.3 ; -18.35,-4.95 18.35,-4.95 18.35,4.95 -18.35,4.95 -18.35,-4.95
Top Courtyard:
  lines w0.05: -19.11,-5.225 -19.11,11.41 19.11,11.41 19.11,-5.225 -19.11,-5.225
Top Component Center:
  lines w0.05: -0.5,0 0.5,0 ; 0,-0.5 0,0.5
3D body "662022230822.stp": height 8.78, standoff -3.08, extent -18.35,-4.95 18.35,10.95

## 662022231722 [mm] "3.00mm SMT Male Dual Row Angled Header with SMT Solder Tab, 22p"
height 8.26
pads (24):
  rect 1.27x2.92 smd: 1(15,5.13) 2(12,5.13) 3(9,5.13) 4(6,5.13) 5(3,5.13) 6(0,5.13) 7(-3,5.13) 8(-6,5.13) 9(-9,5.13) 10(-12,5.13) 11(-15,5.13) 12(15,9.75) 13(12,9.75) 14(9,9.75) 15(6,9.75) 16(3,9.75) 17(0,9.75) 18(-3,9.75) 19(-6,9.75) 20(-9,9.75) 21(-12,9.75) 22(-15,9.75)
  rect 3.43x1.65 smd: MP1(-18.895,-0.35) MP2(18.895,-0.35)
Top Overlay:
  circle w0.25: c16.25,5.625 r0.125
  lines w0.2: -18.5,-1.475 -18.5,-5.025 18.5,-5.025 18.5,-1.475 ; -18.5,0.775 -18.5,5.025 -15.95,5.025 ; 15.95,5.025 18.5,5.025 18.5,0.775
Top Designator:
  text ".Designator" at -7.498,-0.5 h1.5
Top Component Outline:
  lines w0.1: -18.35,-1.1 -20.05,-1.1 -20.05,0.4 -18.35,0.4 ; -15.32,4.95 -15.32,10.95 -14.68,10.95 -14.68,4.95 ; -15.32,6.3 -14.68,6.3 ; -12.32,4.95 -12.32,10.95 -11.68,10.95 -11.68,4.95 ; -12.32,6.3 -11.68,6.3 ; -9.32,4.95 -9.32,10.95 -8.68,10.95 -8.68,4.95 ; -9.32,6.3 -8.68,6.3 ; -6.32,4.95 -6.32,10.95 -5.68,10.95 -5.68,4.95 ; -6.32,6.3 -5.68,6.3 ; -3.32,4.95 -3.32,10.95 -2.68,10.95 -2.68,4.95 ; -3.32,6.3 -2.68,6.3 ; -0.32,4.95 -0.32,10.95 0.32,10.95 0.32,4.95 ; -0.32,6.3 0.32,6.3 ; 2.68,4.95 2.68,10.95 3.32,10.95 3.32,4.95 ; 2.68,6.3 3.32,6.3 ; 5.68,4.95 5.68,10.95 6.32,10.95 6.32,4.95 ; 5.68,6.3 6.32,6.3 ; 8.68,4.95 8.68,10.95 9.32,10.95 9.32,4.95 ; 8.68,6.3 9.32,6.3 ; 11.68,4.95 11.68,10.95 12.32,10.95 12.32,4.95 ; 11.68,6.3 12.32,6.3 ; 14.68,4.95 14.68,10.95 15.32,10.95 15.32,4.95 ; 14.68,6.3 15.32,6.3 ; 18.35,-1.1 20.05,-1.1 20.05,0.4 18.35,0.4 ; -18.35,-4.95 18.35,-4.95 18.35,4.95 -18.35,4.95 -18.35,-4.95
Top 3D Body:
  lines w0.1: -18.35,-1.1 -20.05,-1.1 -20.05,0.4 -18.35,0.4 ; -15.32,4.95 -15.32,10.95 -14.68,10.95 -14.68,4.95 ; -15.32,6.3 -14.68,6.3 ; -12.32,4.95 -12.32,10.95 -11.68,10.95 -11.68,4.95 ; -12.32,6.3 -11.68,6.3 ; -9.32,4.95 -9.32,10.95 -8.68,10.95 -8.68,4.95 ; -9.32,6.3 -8.68,6.3 ; -6.32,4.95 -6.32,10.95 -5.68,10.95 -5.68,4.95 ; -6.32,6.3 -5.68,6.3 ; -3.32,4.95 -3.32,10.95 -2.68,10.95 -2.68,4.95 ; -3.32,6.3 -2.68,6.3 ; -0.32,4.95 -0.32,10.95 0.32,10.95 0.32,4.95 ; -0.32,6.3 0.32,6.3 ; 2.68,4.95 2.68,10.95 3.32,10.95 3.32,4.95 ; 2.68,6.3 3.32,6.3 ; 5.68,4.95 5.68,10.95 6.32,10.95 6.32,4.95 ; 5.68,6.3 6.32,6.3 ; 8.68,4.95 8.68,10.95 9.32,10.95 9.32,4.95 ; 8.68,6.3 9.32,6.3 ; 11.68,4.95 11.68,10.95 12.32,10.95 12.32,4.95 ; 11.68,6.3 12.32,6.3 ; 14.68,4.95 14.68,10.95 15.32,10.95 15.32,4.95 ; 14.68,6.3 15.32,6.3 ; 18.35,-1.1 20.05,-1.1 20.05,0.4 18.35,0.4 ; -18.35,-4.95 -18.35,4.95 18.35,4.95 18.35,-4.95 -18.35,-4.95
Top Courtyard:
  lines w0.05: -20.81,-5.225 -20.81,11.41 20.81,11.41 20.81,-5.225 -20.81,-5.225
Top Component Center:
  lines w0.05: -0.5,0 0.5,0 ; 0,-0.5 0,0.5
3D body "662022231722.stp": height 8.79, standoff 0.03, extent -20.05,-4.95 20.05,10.95